# EAGLE library part 6220XX21121_62201021121 (library WR-PHD)
WR-PHD 1.27 mm THT Dual Pin Header Article Properties 4 unitless; 8 unitless; 10 unitless; 14 unitless; 16 unitless; 20 unitless; 28 unitless General Information Operating Temperature -40 °C up to +105 °C Compliance Lead free / RoHS Pitch 1.27 mm Durability 50 Cycles Rows Dual Gender Pin Header Type Straight Material Properties Insulator Material PA9T Insulator Flammability Rating UL94 V-0 Contact Material Copper Alloy Contact Plating Gold Contact Type Stamped Certification UL Approval E323964 Packaging Properties Packaging Box Electrical Properties IR 1 A Withstanding Voltage 300 V (AC) Contact Resistance 20 mΩ RISO 500 MΩ <https://www.we-online.com/components/media/o33223v209%20Family_WR-PHD_6220xx21121.jpg> Details see: www.we-online.com/en/components/products/PHD_1_27_THT_DUAL_PIN_HEADER_6220XX21121 <www.we-online.com/en/components/products/PHD_1_27_THT_DUAL_PIN_HEADER_6220XX21121/?utm_source=eagle_model&utm_medium=description_link&utm_campaign=eisos_eagle> Updated by Ella 2024-02-05 2024 (C) Würth Elektronik
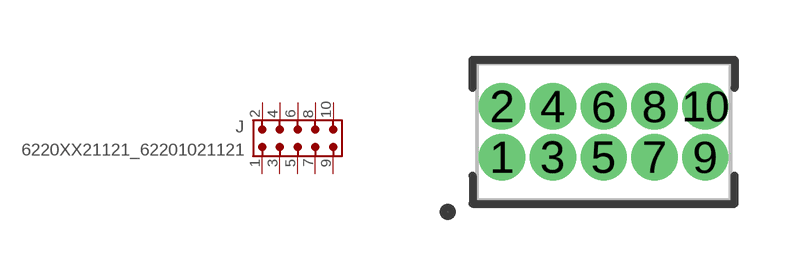
[diagram p383: symbol with the pads of 62201021121; footprint 62201021121]

Designator prefix J

## 6220XX21121_62201021121 (DATASHEET-URL: https://www.we-online.com/redexpert/spec/62201021121?ae; GENDER: Pin Header; IR: 1A; MOUNT: THT; PACKAGING: Box; PART-NUMBER: 62201021121; PINS: 10; PITCH: 1.27 mm; ROWS: Dual; TYPE: Straight; VALUE: 62201021121)  [62201021121]
1  1  pas
2  2  pas
3  3  pas
4  4  pas
5  5  pas
6  6  pas
7  7  pas
8  8  pas
9  9  pas
10  10  pas

## Footprint 62201021121 (pad centres in mm)
WR-PHD 1.27 mm THT Dual Pin Header,10 Pins
drill 0.65 pad 1.05: 1 -2.54,-0.635; 2 -2.54,0.635; 3 -1.27,-0.635; 4 -1.27,0.635; 5 0,-0.635; 6 0,0.635; 7 1.27,-0.635; 8 1.27,0.635; 9 2.54,-0.635; 10 2.54,0.635